# Altium footprint library B81123C1222M.PcbLib: 1 footprints
Each footprint in its own frame and in the unit in brackets; x right, y up, seen from the top. Pads: shape width x height; smd on the part's side, far side on the other; paste and mask are expansions set on the pad; w line width, h text height; cw(c..) or ccw(c..) is an arc to the next point about the centre after c.
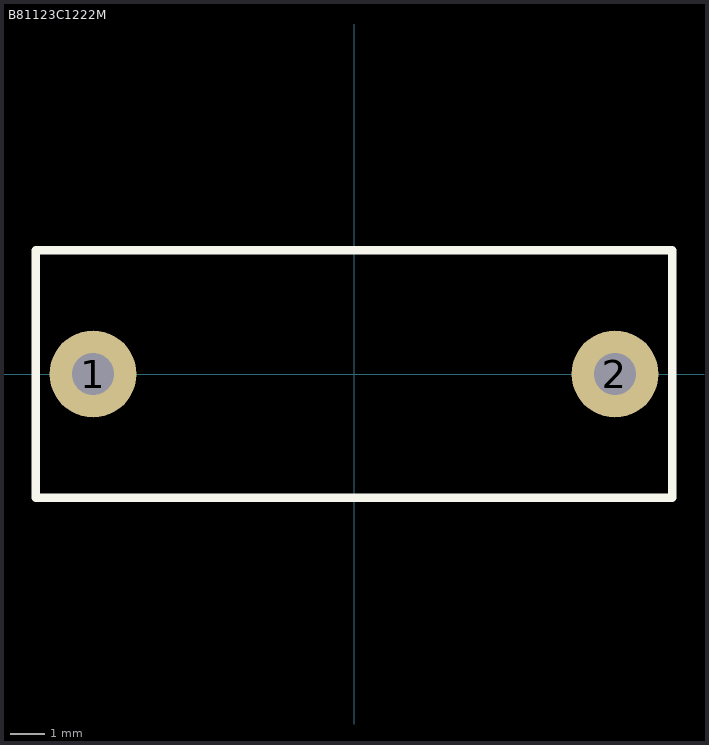
[diagram p0: the footprint, top view; thin cyan lines are the x and y axes]

## B81123C1222M [mm] "B81123C1222M"
pads (2):
  round 2.5 hole 1.2: 1(-7.5,0) 2(7.5,0)
Top Overlay:
  lines w0.254: -9.144,-3.556 9.144,-3.556 9.144,3.556 -9.144,3.556 -9.144,-3.556
3D body "B81123C1222M.stp": height 12.75, standoff -4.75, extent -9,-3.5 9,3.5